# Altium schematic symbol library Gateway_Academic.SchLib: 66 symbols (part 2 of 2)
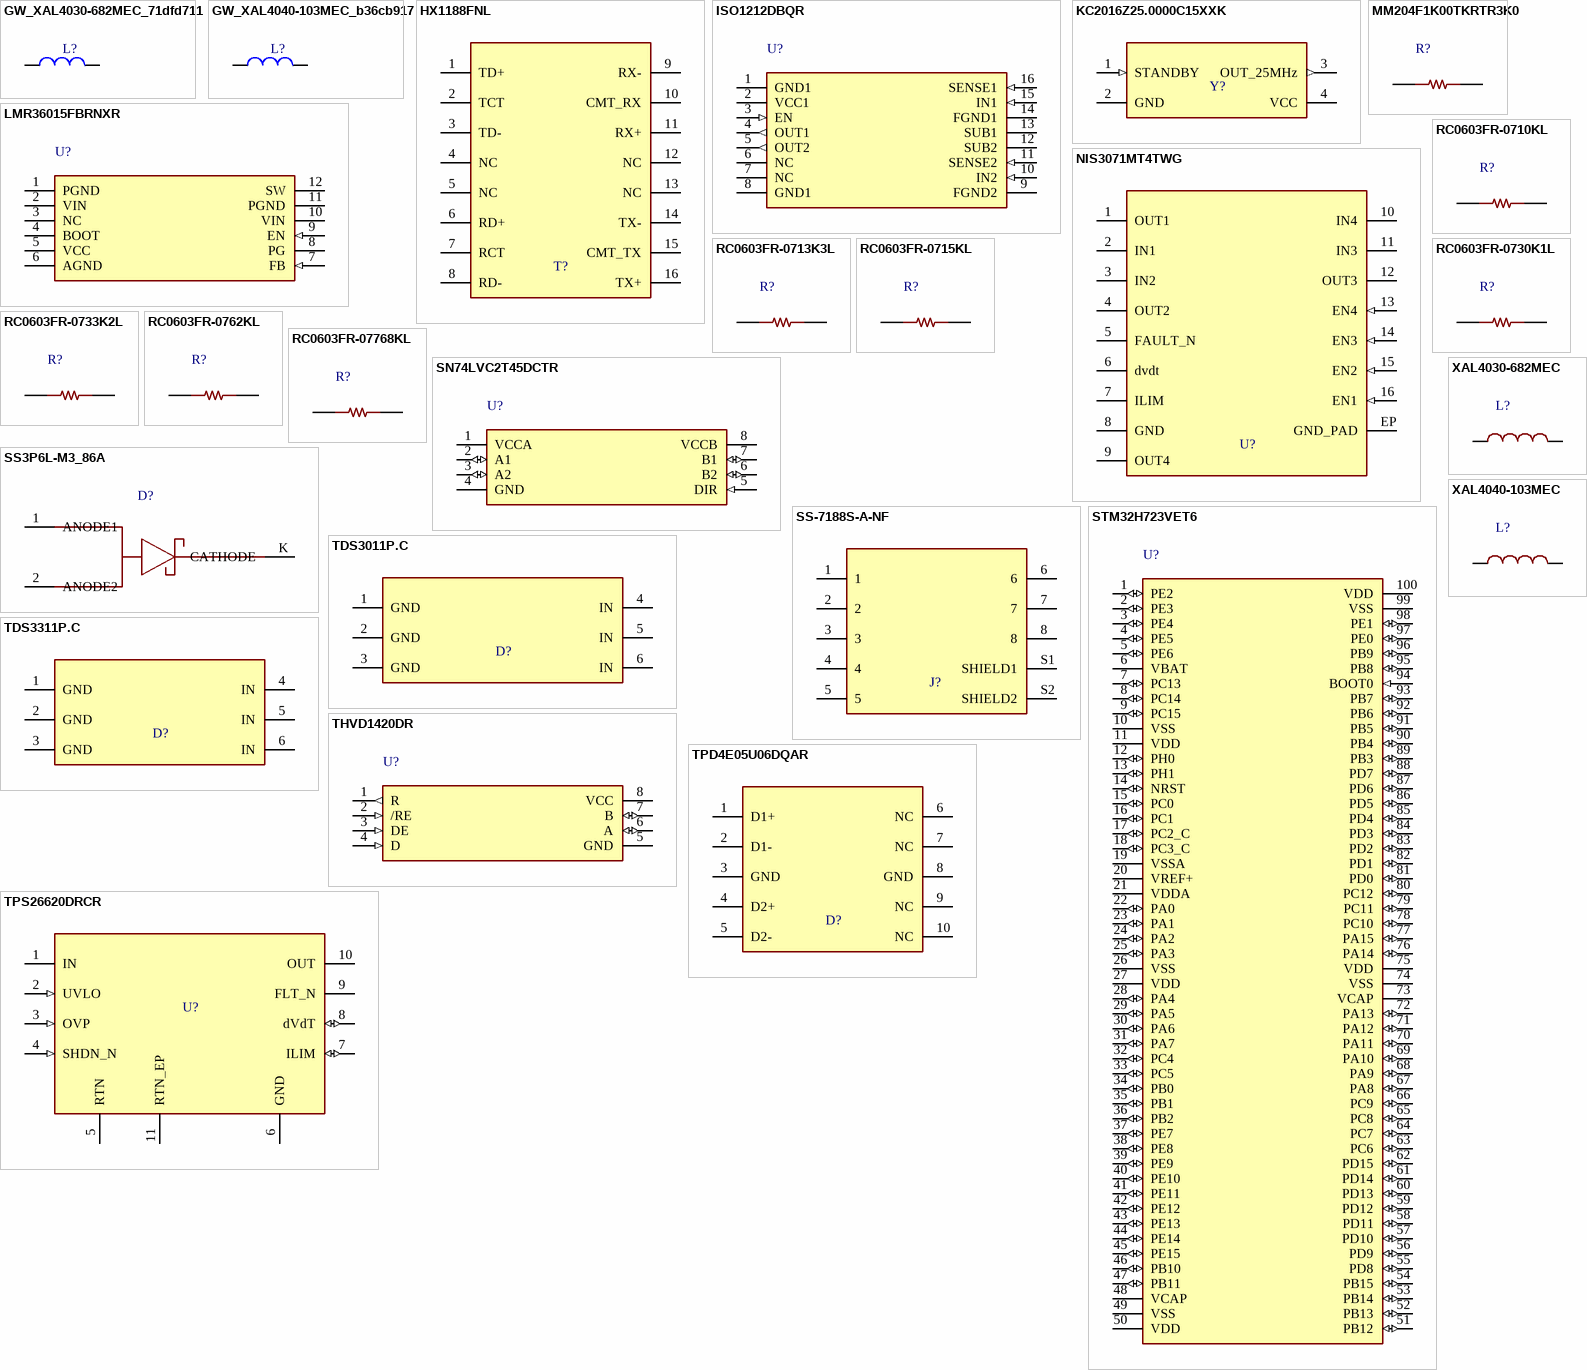
[diagram p2: symbols GW_XAL4030-682MEC_71dfd711 to XAL4040-103MEC]

## XAL4040-103MEC
designator L?
Coilcraft document806-4 revised02/25/26 Recommended Land Pattern; Nonpolar winding; pin1=marked high-dv/dt end by project convention. Full load/hot Isat and loss qualification pending.; Manufacturer Part Number: XAL4040-103MEC; CAD Status: CAD_CANDIDATE; Manufacturer: Coilcraft; Source: Coilcraft document806-4 revised02/25/26 Recommended Land Pattern; Limitations: Nonpolar winding; pin1=marked high-dv/dt end by project convention. Full load/hot Isat and loss qualification pending.
footprint GW_XAL4040_COILCRAFT
pins: 1, 2